# Altium footprint library Capacitors.PcbLib: 93 footprints (part 5 of 6)
Each footprint in its own frame and in the unit in brackets; x right, y up, seen from the top. Pads: shape width x height; smd on the part's side, far side on the other; paste and mask are expansions set on the pad; w line width, h text height; cw(c..) or ccw(c..) is an arc to the next point about the centre after c.
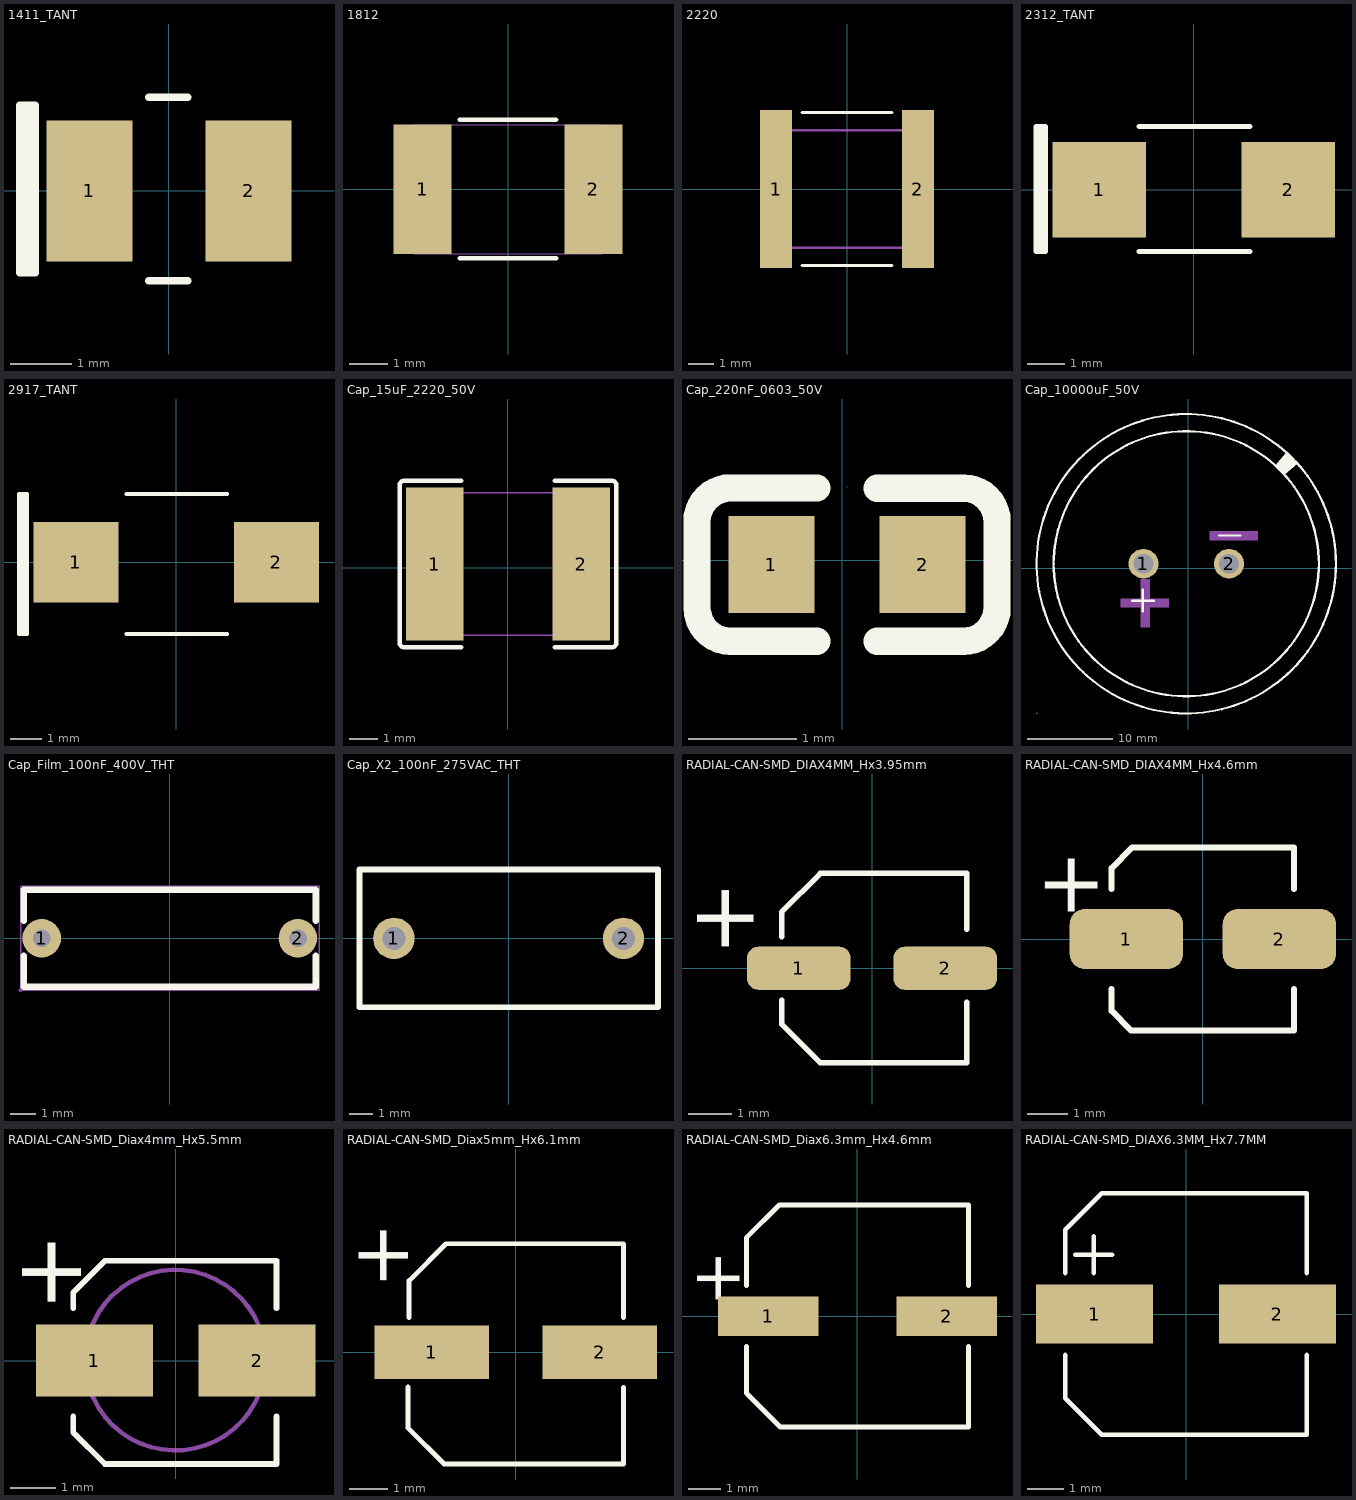
[diagram p4: the footprints below, top view; thin cyan lines are the x and y axes]

## 1411_TANT [mm] "20220701 / E.Naranjo"
pads (2):
  rect 1.405x2.3 smd: 1(-1.3,0) 2(1.3,0)
Top Overlay:
  lines w0.127: -2.31,-1.339 -2.31,1.393 ; -0.332,-1.469 0.303,-1.469 ; -0.332,1.529 0.303,1.529 ; -2.437,-1.339 -2.183,-1.339 -2.183,1.393 -2.437,1.393 -2.437,-1.339
3D body "CTSM_TCM2NK_3528_L3.7W3H2.1T0.13S0.8F2.3A1.9B0.55E2.2G1.8P0.5R1X0.2.step": height 2.12, standoff 0.01, extent -1.836,-1.471 1.864,1.529

## 1812 [mm] "/20220517/F-A.Ospina"
pads (2):
  rect 1.52x3.4 smd paste+0: 1(-2.248,0) 2(2.248,0)
Top Overlay:
  lines w0.127: -1.272,1.829 1.267,1.829 ; -1.27,-1.817 1.27,-1.817
Mechanical 13:
  lines w0.025: -2.451,-1.702 -2.451,1.702 ; -2.451,-1.702 -1.689,-1.702 -1.689,1.702 -2.451,1.702 ; -2.451,-1.702 -2.451,1.702 ; -2.451,-1.702 2.451,-1.702 ; -2.451,1.702 2.451,1.702 ; 2.451,-1.702 1.689,-1.702 1.689,1.702 2.451,1.702 ; 2.451,-1.702 2.451,1.702 ; 2.451,-1.702 2.451,1.702
3D body "CAP_CC1812_YAG.step": height 3.4, standoff 0, extent -2.451,-1.702 2.451,1.702

## 2220 [mm] "5750 Metric / 20190221 / C-A.Serna.A"
height 2.5
pads (2):
  rect 1.25x6.2 smd: 1(-2.775,0) 2(2.775,0)
Top Overlay:
  lines w0.127: -1.75,-3 1.75,-3 ; -1.75,3 1.75,3
Mechanical 1:
  lines w0.1: -3.05,-2.3 3.05,-2.3 3.05,2.3 -3.05,2.3 -3.05,-2.3
3D body: height 2.5, standoff 0, extent -3.05,-2.3 -2.7,2.3
3D body: height 2.5, standoff 0, extent -2.7,-2.3 2.7,2.3
3D body: height 2.5, standoff 0, extent 2.7,-2.3 3.05,2.3

## 2312_TANT [mm] "6032 Metric / 20230427 / J.Jaramillo"
pads (2):
  rect 2.5x2.55 smd: 1(-2.525,0) 2(2.525,0)
Top Overlay:
  lines w0.127: -4.089,-1.655 -4.089,1.69 ; -1.465,-1.655 1.505,-1.655 ; -1.465,1.69 1.505,1.69 ; -4.216,-1.655 -4.216,1.69 -3.962,1.69 -3.962,-1.655 -4.216,-1.655
3D body "2312.step": height 2.7, standoff 0, extent -3.085,-1.655 3.015,1.695

## 2917_TANT [mm] "7343 Metric / 20230427/ J.Jaramillo"
pads (2):
  rect 2.7x2.55 smd: 1(-3.175,0) 2(3.175,0)
Top Overlay:
  lines w0.127: -4.851,-2.285 -4.851,2.165 ; -1.58,-2.285 1.61,-2.285 ; -1.58,2.165 1.61,2.165 ; -4.978,-2.285 -4.978,2.165 -4.724,2.165 -4.724,-2.285 -4.978,-2.285
3D body "2917-3d.step": height 4.2, standoff 0, extent -3.685,-2.285 3.715,2.165

## Cap_15uF_2220_50V [mm] "CAP CER 15uF 50V X7R 2220"
pads (2):
  rect 2.01x5.4 smd paste-100 mask+0.051: 1(-2.577,0.135) 2(2.584,0.135)
Top Overlay:
  lines w0.152: -1.648,-2.794 -3.658,-2.794 cw(c-3.658,-2.642) -3.81,-2.642 -3.81,2.911 cw(c-3.658,2.911) -3.658,3.063 -1.648,3.063 ; 1.655,-2.794 3.665,-2.794 ccw(c3.665,-2.642) 3.817,-2.642 3.817,2.911 ccw(c3.665,2.911) 3.665,3.063 1.655,3.063
Top Paste:
  region: 1.579,-2.465 1.579,-0.883 1.679,-0.783 2.162,-0.783 2.262,-0.683 2.262,0.953 2.162,1.053 1.679,1.053 1.579,1.153 1.579,2.735 1.679,2.835 3.489,2.835 3.589,2.735 3.589,-2.465 3.489,-2.565 1.679,-2.565
  region: -1.571,-2.465 -1.571,-0.883 -1.671,-0.783 -2.155,-0.783 -2.255,-0.683 -2.255,0.953 -2.155,1.053 -1.671,1.053 -1.571,1.153 -1.571,2.735 -1.671,2.835 -3.481,2.835 -3.581,2.735 -3.581,-2.465 -3.481,-2.565 -1.671,-2.565
Mechanical 6:
  lines w0.051: -2.846,-2.365 -2.846,2.635 2.854,2.635 2.854,-2.365 -2.846,-2.365
Mechanical 8:
  region: -2.786,-2.366 -2.786,-2.39 -2.821,-2.425 -2.871,-2.425 -2.906,-2.39 -2.906,-2.366 -2.906,-2.341 -2.871,-2.306 -2.821,-2.306 -2.786,-2.341
Mechanical 9:
  region: -2.846,-2.365 -2.846,2.635 -1.996,2.635 -1.996,-2.365
  region: 2.854,-2.365 2.854,2.635 2.004,2.635 2.004,-2.365

## Cap_220nF_0603_50V [mm] "CAP CER 220NF 50V X7R 0603"
pads (2):
  rect 0.8x0.9 smd paste+0 mask+0.051: 1(-0.654,-0.04) 2(0.746,-0.04)
Top Overlay:
  lines w0.254: -0.234,-0.75 -1.034,-0.75 cw(c-1.034,-0.44) -1.344,-0.44 -1.344,0.36 cw(c-1.034,0.36) -1.034,0.67 -0.234,0.67 ; 0.326,-0.75 1.126,-0.75 ccw(c1.126,-0.441) 1.436,-0.441 1.436,0.359 ccw(c1.126,0.359) 1.126,0.669 0.326,0.669
Mechanical 15:
  lines w0.003: 0.046,0.681 0.046,0.681

## Cap_10000uF_50V [mm] "10000uF 50V"
pads (2):
  round 3.5 hole 2.3: 1(-5.215,0.547) 2(4.785,0.547)
Top Overlay:
  circle w0.254: c-0.215,0.547 r15.5
  circle w0.254: c-0.215,0.547 r17.5
  region: 11.469,13.501 10.199,11.977 11.215,10.961 12.739,12.231
  lines w0.254: -6.565,-3.771 -4.025,-3.771 ; -5.295,-5.041 -5.295,-2.501 ; 3.595,3.849 6.135,3.849
Mechanical 2:
  region: 2.552,3.309 2.552,4.325 8.14,4.325 8.14,3.309
  region: -4.501,-6.858 -5.517,-6.858 -5.517,-1.27 -4.501,-1.27
  region: -7.874,-4.565 -7.874,-3.549 -2.286,-3.549 -2.286,-4.565
Mechanical 6:
  lines w0.051: -17.72,0.547 ccw(c-0.215,0.547) 17.29,0.547 ccw(c-0.215,0.547) -17.72,0.547
Mechanical 8:
  region: -17.66,-16.958 -17.66,-16.983 -17.695,-17.018 -17.745,-17.018 -17.78,-16.983 -17.78,-16.958 -17.78,-16.933 -17.745,-16.898 -17.695,-16.898 -17.66,-16.933
Mechanical 9:
  region: 4.035,0.947 5.535,0.947 5.535,0.147 4.035,0.147
  region: -5.965,0.947 -4.465,0.947 -4.465,0.147 -5.965,0.147
3D body "CAP_C40_NCH.step": height 42.03, standoff -8.1, extent -17.716,-16.947 17.321,18.041

## Cap_Film_100nF_400V_THT [mm] "100 nF Film Capacitor"
pads (2):
  round 1.5 hole 0.7: 1(-5,0) 2(5,0)
Top Overlay:
  lines w0.254: -5.7,-0.686 -5.7,-1.9 5.7,-1.9 5.7,-0.686 ; -5.7,0.686 -5.7,1.9 5.7,1.9 5.7,0.686
Mechanical 6:
  lines w0.051: -5.827,-2.027 5.827,-2.027 5.827,2.027 -5.827,2.027 -5.827,-2.027
Mechanical 8:
  region: -5.767,-2.027 -5.767,-2.052 -5.802,-2.087 -5.852,-2.087 -5.887,-2.052 -5.887,-2.027 -5.887,-2.002 -5.852,-1.967 -5.802,-1.967 -5.767,-2.002
Mechanical 9:
  region: -4.75,0 -4.75,-0.05 -4.788,-0.142 -4.858,-0.212 -4.95,-0.25 -5.05,-0.25 -5.142,-0.212 -5.212,-0.142 -5.25,-0.05 -5.25,0 -5.25,0.05 -5.212,0.142 -5.142,0.212 -5.05,0.25 -4.95,0.25 -4.858,0.212 -4.788,0.142 -4.75,0.05
  region: 5.25,0 5.25,-0.05 5.212,-0.142 5.142,-0.212 5.05,-0.25 4.95,-0.25 4.858,-0.212 4.788,-0.142 4.75,-0.05 4.75,0 4.75,0.05 4.788,0.142 4.858,0.212 4.95,0.25 5.05,0.25 5.142,0.212 5.212,0.142 5.25,0.05

## Cap_X2_100nF_275VAC_THT [mm] "100 nF X2 Safety Capacitor"
pads (2):
  round 1.8 hole 1: 1(-5,0) 2(5,0)
Top Overlay:
  lines w0.254: -6.5,-3 6.5,-3 6.5,3 -6.5,3 -6.5,-3
Mechanical 6:
  lines w0.051: -6.5,-3 -6.5,3 6.5,3 6.5,-3 -6.5,-3
Mechanical 8:
  region: -6.44,-3 -6.44,-3.025 -6.475,-3.06 -6.525,-3.06 -6.56,-3.025 -6.56,-3 -6.56,-2.975 -6.525,-2.94 -6.475,-2.94 -6.44,-2.975
Mechanical 9:
  region: 5.3,0 5.3,-0.06 5.254,-0.17 5.17,-0.254 5.06,-0.3 4.94,-0.3 4.83,-0.254 4.746,-0.17 4.7,-0.06 4.7,0 4.7,0.06 4.746,0.17 4.83,0.254 4.94,0.3 5.06,0.3 5.17,0.254 5.254,0.17 5.3,0.06
  region: -4.7,0 -4.7,-0.06 -4.746,-0.17 -4.83,-0.254 -4.94,-0.3 -5.06,-0.3 -5.17,-0.254 -5.254,-0.17 -5.3,-0.06 -5.3,0 -5.3,0.06 -5.254,0.17 -5.17,0.254 -5.06,0.3 -4.94,0.3 -4.83,0.254 -4.746,0.17 -4.7,0.06

## RADIAL-CAN-SMD_DIAX4MM_Hx3.95mm [mm] "/20200715/N-A.Potosi"
pads (2):
  rrect50% 2.4x1 smd: 1(-1.7,0) 2(1.7,0)
Top Overlay:
  lines w0.127: -2.1,-0.738 -2.1,-1.3 -1.2,-2.2 2.2,-2.2 2.2,-0.786 ; -2.1,0.727 -2.1,1.3 -1.2,2.2 2.2,2.2 2.2,0.904
  text "+" at -4.064,2.032 h1.52
3D body "PCAP_4x3-ELECT_NCA.step": height 3.25, standoff 0, extent -2.502,-2.248 2.502,2.248

## RADIAL-CAN-SMD_DIAX4MM_Hx4.6mm [mm] "/20200416V-A.Patino"
pads (2):
  rrect50% 2.819x1.5 smd: 1(-1.905,0) 2(1.905,0)
Top Overlay:
  lines w0.152: -2.273,-1.247 -2.273,-1.791 -1.791,-2.273 2.273,-2.273 2.273,-1.247 ; -2.273,1.247 -2.273,1.765 -1.765,2.273 2.273,2.273 2.273,1.247
  text "+" at -4.153,0.675 h1.52
3D body "CAP_UZP_4X4P5-M.step": height 4.65, standoff 0, extent -2.541,-2.159 2.667,2.133

## RADIAL-CAN-SMD_Diax4mm_Hx5.5mm [mm] "20191118 / J-P.Vargas.A"
pads (2):
  rect 2.6x1.6 smd: 1(-1.8,0) 2(1.8,0)
Top Overlay:
  lines w0.127: -2.27,-1.24 -2.27,-1.59 -1.57,-2.29 2.23,-2.29 2.23,-1.24 ; -2.27,1.16 -2.27,1.51 -1.57,2.21 2.23,2.21 2.23,1.16
  text "+" at -3.4,2.83 h1.52
Mechanical 1:
  circle w0.1: c-0.01,0.01 r2
3D body "865090640005.step": height 5.21, standoff -0.29, extent -2.503,-2.15 2.504,2.15

## RADIAL-CAN-SMD_Diax5mm_Hx6.1mm [mm] "20190618 / M.X-Arias"
pads (2):
  rect 3x1.4 smd: 1(-2.2,0) 2(2.2,0)
Top Overlay:
  lines w0.127: -2.819,-0.9 -2.819,-1.981 -1.88,-2.921 2.819,-2.921 2.819,-0.91 ; -2.794,0.91 -2.794,1.88 -1.829,2.845 2.819,2.845 2.819,0.91
  text "+" at -4.11,3.41 h1.52
3D body "CAP_SMD_radial.stp": height 6.15, standoff 0, extent -3.241,-2.726 3.261,2.786

## RADIAL-CAN-SMD_Diax6.3mm_Hx4.6mm [mil] "20200923/ V-A.Patino"
pads (2):
  rect 122x48 smd: 1(-108.5,0) 2(108.5,0)
Top Overlay:
  lines w6: -135,-37.1 -135,-93.5 -93.5,-135 135,-135 135,-37.1 ; -135,37.1 -135,95.04 -95.04,135 135,135 135,37.1
  text "+" at -195,80 h60
3D body: height 10, standoff 0, extent 0,0 10,10
3D body "CAP_UZP_6P3X4P5_NCH.step": height 183.11, standoff 0, extent -149.48,-130 149.49,130

## RADIAL-CAN-SMD_DIAX6.3MM_Hx7.7MM [mm] "/20220517/F-A.Ospina"
pads (2):
  rect 3.2x1.6 smd: 1(-2.5,0) 2(2.5,0)
Top Overlay:
  lines w0.127: -3.3,-1.12 -3.3,-2.3 -2.3,-3.3 3.3,-3.3 3.3,-1.12 ; -3.3,1.12 -3.3,2.3 -2.3,3.3 3.3,3.3 3.3,1.12 ; -3.024,1.619 -2.024,1.619 ; -2.524,1.119 -2.524,2.119
3D body "step_temp.STEP": height 7.7, standoff 0, extent -3.65,-3.325 3.65,3.275